# Altium footprint library Amin-Library.PcbLib: 601 footprints (part 10 of 38)
Each footprint in its own frame and in the unit in brackets; x right, y up, seen from the top. Pads: shape width x height; smd on the part's side, far side on the other; paste and mask are expansions set on the pad; w line width, h text height; cw(c..) or ccw(c..) is an arc to the next point about the centre after c.
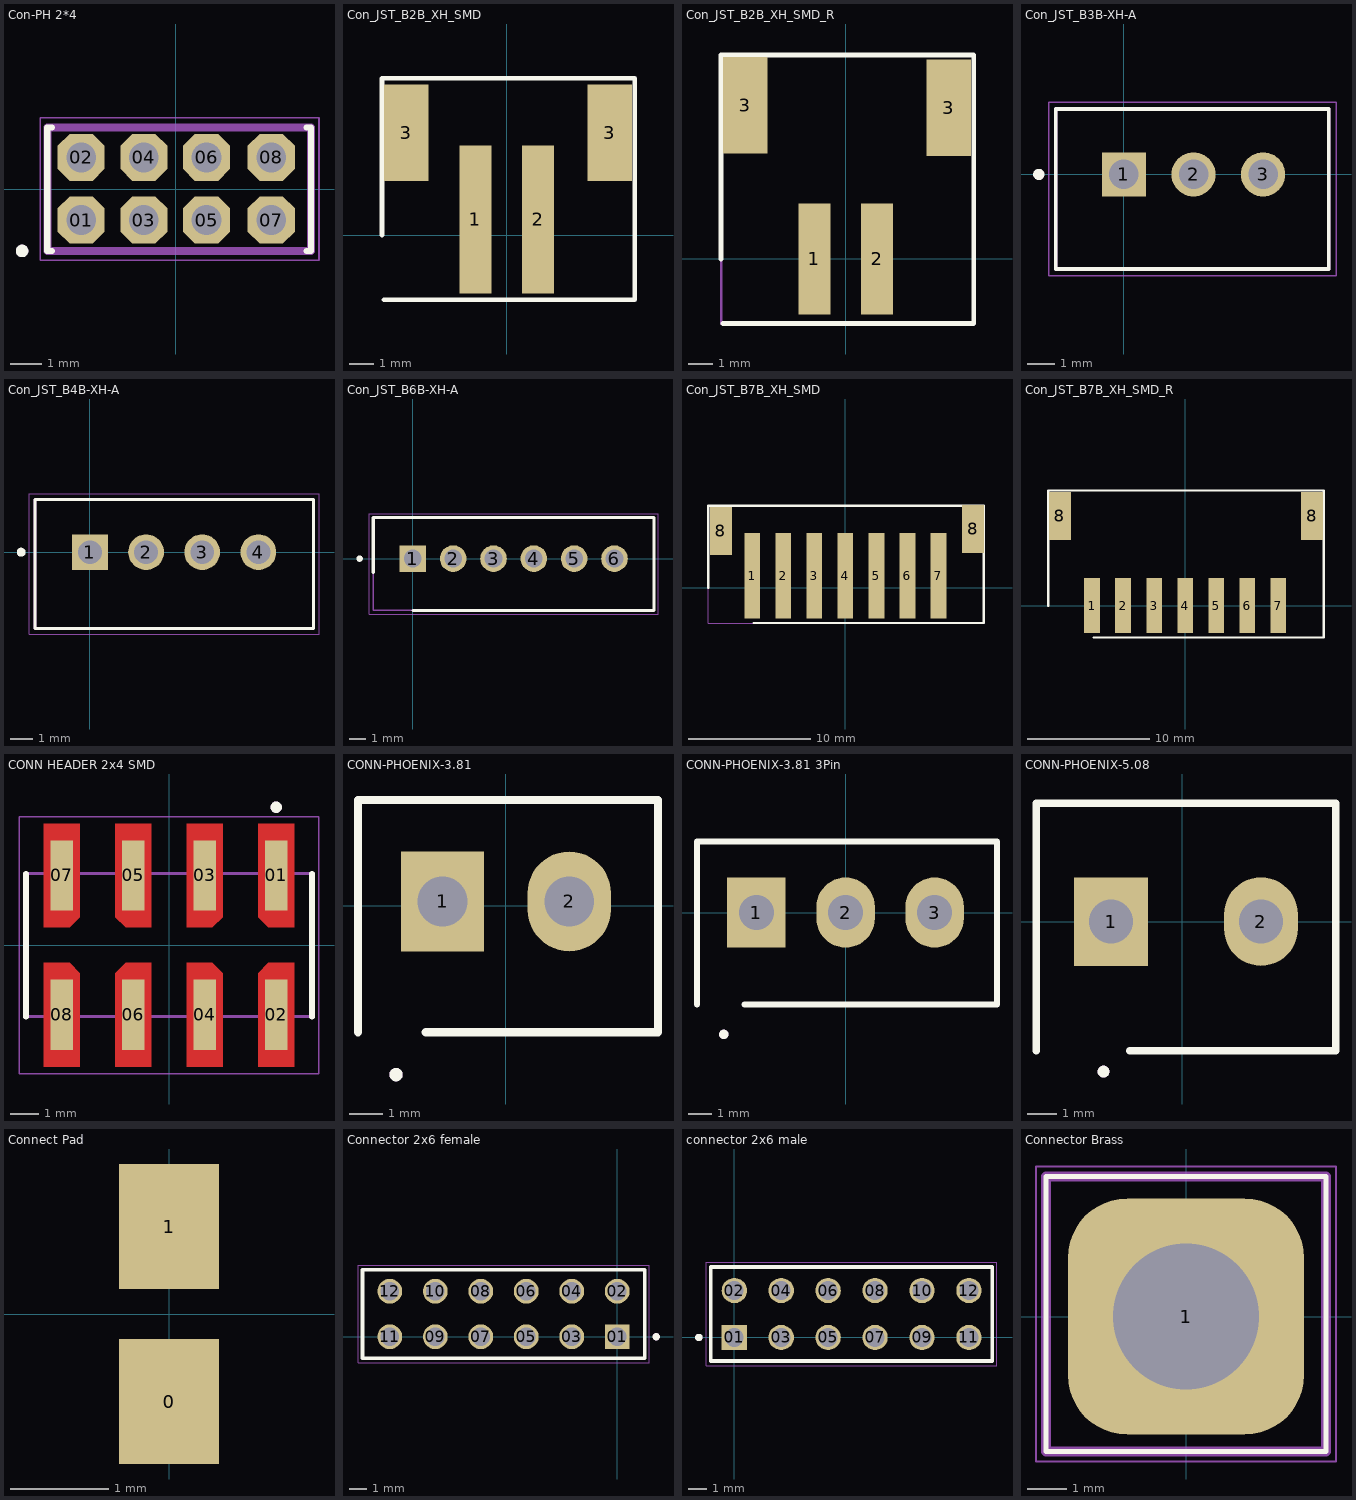
[diagram p9: the footprints below, top view; thin cyan lines are the x and y axes]

## Con-PH 2*4 [mil]
pads (8):
  oct 59.08x59.08 / inner oct 60x60 / far side oct 59.08x59.08 hole 37.4: 01(-118.74,-38.74) 02(-118.74,40) 03(-40,-38.74) 04(-40,40) 05(38.74,-38.74) 06(38.74,40) 07(120,-38.74) 08(120,40)
Top Overlay:
  circle w7.87: c-192.87,-77.56 r3.94
  lines w7.87: -155.71,-77.56 -161.22,-77.56 -161.22,77.56 -155.71,77.56 ; 164.49,-77.56 170,-77.56 170,77.56 164.49,77.56
Top Courtyard:
  lines w10: 170,77.56 170,-77.56 -161.22,-77.56 -161.22,77.56 170,77.56 ; 170,77.56 170,77.56
Mechanical 13:
  circle w7.87: c-192.87,-77.56 r3.94
  lines w3.94: 77.24,77.56 -161.22,77.56 ; -161.22,-77.56 -161.22,-67.56 -161.22,77.56 ; -161.22,-77.56 170,-77.56 170,77.56 -161.22,77.56 ; -161.22,-77.56 -161.22,77.56
Mechanical 15:
  lines w1.97: -170,-89.47 -170,90 180,90 180,-89.47 -170,-89.47
3D body "62000821121.stp": height 236.72, standoff -105.8, extent -157.48,-83.73 157.48,73.74

## Con_JST_B2B_XH_SMD [mil]
pads (4):
  rect 51.18x236.22 smd: 1(-50,25) 2(50,25)
  rect 71x154 smd paste+0 mask-77: 3(-160,163) 3(164,163)
Top Overlay:
  lines w7.87: -199,0 -199,250 204,250 204,-103 -195.85,-103
3D body "JST-XH_2V_SMD.step": height 303.15, standoff -1.97, extent -195.85,-86.67 197.85,244

## Con_JST_B2B_XH_SMD_R [mil]
pads (4):
  rect 51.18x177.17 smd: 1(-50,0) 2(50,0)
  rect 71x154 smd paste-77 mask-77: 3(-160,245) 3(164,241)
Top Overlay:
  lines w7.87: -199,0 -199,325 204,325 204,-103 -195.85,-103
Mechanical 13:
  lines w3.94: -198,-103 -198,326 204,326 204,-103 -198,-103
3D body "JST-XH2-SMD.step": height 236.22, standoff -3.94, extent -198.85,-76.49 194.85,325.09

## Con_JST_B3B-XH-A [mm]
pads (3):
  rect 1.59x1.59 hole 1.06: 1(0,0)
  round 1.59 hole 1.06: 2(2.5,0) 3(5,0)
Top Overlay:
  circle w0.2: c-3.06,0 r0.1
  lines w0.127: -2.45,-3.4 7.366,-3.4 7.366,2.35 -2.45,2.35 -2.45,-3.4
Mechanical 13:
  lines w0.127: -2.45,-3.4 7.366,-3.4 7.366,2.35 -2.45,2.35 -2.45,-3.4
Mechanical 15:
  lines w0.05: -2.7,-3.65 7.62,-3.65 7.62,2.6 -2.7,2.6 -2.7,-3.65
3D body "User Library-B3B-XH.STEP": height 7, standoff -3.4, extent -2.517,-3.4 7.383,2.35

## Con_JST_B4B-XH-A [mm]
pads (4):
  rect 1.59x1.59 hole 1.06: 1(0,0)
  round 1.59 hole 1.06: 2(2.5,0) 3(5,0) 4(7.5,0)
Top Overlay:
  circle w0.2: c-3.06,0 r0.1
  lines w0.127: -2.45,-3.4 -2.45,2.35 9.95,2.35 9.95,-3.4 -2.45,-3.4
Mechanical 13:
  lines w0.127: -2.45,-3.4 -2.45,2.35 9.95,2.35 9.95,-3.4 -2.45,-3.4
Mechanical 15:
  lines w0.05: -2.7,-3.65 -2.7,2.6 10.2,2.6 10.2,-3.65 -2.7,-3.65
3D body "User Library-B4B-XH-A.STEP": height 7.01, standoff -3.39, extent -2.39,-3.302 10.01,2.448

## Con_JST_B6B-XH-A [mm]
pads (6):
  rect 1.65x1.65 hole 1.1: 1(0,0)
  round 1.65 hole 1.1: 2(2.5,0) 3(5,0) 4(7.5,0) 5(10,0) 6(12.5,0)
Top Overlay:
  circle w0.2: c-3.302,0 r0.1
  lines w0.2: -2.45,-0.86 -2.45,2.54 14.95,2.54 14.95,-3.21 0,-3.21
Mechanical 13:
  lines w0.1: -2.45,-3.21 14.95,-3.21 14.95,2.54 -2.45,2.54 -2.45,-3.21
Mechanical 15:
  lines w0.05: -2.7,-3.46 15.2,-3.46 15.2,2.79 -2.7,2.79 -2.7,-3.46
3D body "User Library-jst-b6b-xh-a.step": height 7.01, standoff -3.39, extent -2.414,-3.556 14.986,2.194

## Con_JST_B7B_XH_SMD [mm]
pads (9):
  rect 1.3x7 smd paste-0.65: 1(-7.62,1) 2(-5.08,1) 3(-2.54,1) 4(0,1) 5(2.54,1) 6(5.08,1) 7(7.62,1)
  rect 1.803x3.912 smd paste+0 mask-1.956: 8(-10.185,4.674) 8(10.465,4.836)
Top Overlay:
  lines w0.2: -11.227,0 -11.227,6.731 11.354,6.731 11.354,-2.87 -7.493,-2.87
Top Paste:
  rectangle: -8.128,-2.515 -7.112,4.496
  rectangle: -5.588,-2.489 -4.572,4.521
  rectangle: -3.048,-2.515 -2.032,4.496
  rectangle: -0.533,-2.515 0.483,4.496
  rectangle: 2.032,-2.489 3.048,4.521
  rectangle: 4.572,-2.515 5.588,4.496
  rectangle: 7.112,-2.515 8.128,4.496
Mechanical 13:
  lines w0.1: -11.227,-2.87 11.379,-2.87 11.379,6.706 -11.227,6.706 -11.227,-2.87
3D body "JST-XH_7V_SMD.step": height 7.7, standoff -0.05, extent -11.174,-1.663 11.326,6.736

## Con_JST_B7B_XH_SMD_R [mm]
pads (9):
  rect 1.3x4.5 smd: 1(-7.62,0) 2(-5.08,0) 3(-2.54,0) 4(0,0) 5(2.54,0) 6(5.08,0) 7(7.62,0)
  rect 1.803x3.912 smd paste+0 mask-1.956: 8(-10.262,7.341) 8(10.389,7.341)
Top Overlay:
  lines w0.2: -11.227,0 -11.227,9.423 11.354,9.423 11.354,-2.616 -7.493,-2.616
3D body "JST-XH7-SMD.step": height 6, standoff -0.1, extent -11.275,-1.613 11.225,8.587

## CONN HEADER 2x4 SMD [mm]
pads (8):
  rect 0.8x2.5 smd paste-2 mask+0: 01(3.81,2.475) 02(3.81,-2.475) 03(1.27,2.475) 04(1.27,-2.475) 05(-1.27,2.475) 06(-1.27,-2.475) 07(-3.81,2.475) 08(-3.81,-2.475)
Top Layer:
  region: -3.175,-0.995 -3.175,-4.315 -4.445,-4.315 -4.445,-0.635 -3.535,-0.635
  region: -3.175,0.995 -3.535,0.635 -4.445,0.635 -4.445,4.315 -3.175,4.315
  region: -0.635,-4.315 -1.905,-4.315 -1.905,-0.995 -1.545,-0.635 -0.635,-0.635
  region: -0.635,0.635 -1.545,0.635 -1.905,0.995 -1.905,4.315 -0.635,4.315
  region: 1.905,-0.995 1.905,-4.315 0.635,-4.315 0.635,-0.635 1.545,-0.635
  region: 1.905,0.995 1.545,0.635 0.635,0.635 0.635,4.315 1.905,4.315
  region: 4.445,-4.315 3.175,-4.315 3.175,-0.995 3.535,-0.635 4.445,-0.635
  region: 4.445,0.635 3.535,0.635 3.175,0.995 3.175,4.315 4.445,4.315
Top Overlay:
  circle w0.2: c3.81,4.9 r0.1
  lines w0.2: -5.08,-2.54 -5.08,2.54 ; 5.08,-2.54 5.08,2.54
Top Paste:
  region: -3.175,-0.995 -3.175,-4.315 -4.445,-4.315 -4.445,-0.635 -3.535,-0.635
  region: -3.175,0.995 -3.535,0.635 -4.445,0.635 -4.445,4.315 -3.175,4.315
  region: -0.635,-4.315 -1.905,-4.315 -1.905,-0.995 -1.545,-0.635 -0.635,-0.635
  region: -0.635,0.635 -1.545,0.635 -1.905,0.995 -1.905,4.315 -0.635,4.315
  region: 1.905,-0.995 1.905,-4.315 0.635,-4.315 0.635,-0.635 1.545,-0.635
  region: 1.905,0.995 1.545,0.635 0.635,0.635 0.635,4.315 1.905,4.315
  region: 4.445,-4.315 3.175,-4.315 3.175,-0.995 3.535,-0.635 4.445,-0.635
  region: 4.445,0.635 3.535,0.635 3.175,0.995 3.175,4.315 4.445,4.315
Top Solder:
  region: -3.075,-0.995 -3.075,-4.415 -4.545,-4.415 -4.545,-0.535 -3.535,-0.535
  region: -3.075,0.995 -3.535,0.535 -4.545,0.535 -4.545,4.415 -3.075,4.415
  region: -0.535,-4.415 -2.005,-4.415 -2.005,-0.995 -1.545,-0.535 -0.535,-0.535
  region: -0.535,0.535 -1.545,0.535 -2.005,0.995 -2.005,4.415 -0.535,4.415
  region: 2.005,-0.995 2.005,-4.415 0.535,-4.415 0.535,-0.535 1.545,-0.535
  region: 2.005,0.995 1.545,0.535 0.535,0.535 0.535,4.415 2.005,4.415
  region: 4.545,-4.415 3.075,-4.415 3.075,-0.995 3.535,-0.535 4.545,-0.535
  region: 4.545,0.535 3.535,0.535 3.075,0.995 3.075,4.415 4.545,4.415
Mechanical 13:
  circle w0.2: c3.81,4.9 r0.1
  lines w0.1: -5.08,-2.54 5.08,-2.54 5.08,2.54 -5.08,2.54 -5.08,-2.54
Mechanical 15:
  lines w0.05: -5.33,-4.565 5.33,-4.565 5.33,4.565 -5.33,4.565 -5.33,-4.565
3D body "TSM-104-02-S-DV (1).stp": height 11.95, standoff 0.01, extent -5.08,-3.848 5.08,3.594

## CONN-PHOENIX-3.81 [mm]
pads (2):
  rect 2.5x3 hole 1.5: 1(-1.905,0.127)
  oval 2.5x3 hole 1.5: 2(1.905,0.127)
Top Overlay:
  circle w0.2: c-3.302,-5.08 r0.1
  lines w0.254: -4.445,-3.81 -4.445,3.175 4.572,3.175 4.572,-3.81 -2.413,-3.81
Mechanical 13:
  circle w0.2: c-3.302,-5.08 r0.1
3D body "User Library-CO2-3_81.step": height 9.2, standoff -3.4, extent -4.441,-4.075 4.569,3.175

## CONN-PHOENIX-3.81 3Pin [mm]
pads (3):
  rect 2.5x3 hole 1.5: 1(-3.81,0)
  oval 2.5x3 hole 1.5: 2(0,0) 3(3.81,0)
Top Overlay:
  circle w0.2: c-5.207,-5.207 r0.1
  lines w0.254: -6.35,-3.937 -6.35,3.048 6.477,3.048 6.477,-3.937 -4.318,-3.937
Mechanical 13:
  circle w0.2: c-5.207,-5.207 r0.1
3D body "1707434.stp": height 9.2, standoff -2.6, extent -6.41,-4.191 6.41,3.059

## CONN-PHOENIX-5.08 [mm]
pads (2):
  rect 2.5x3 hole 1.5: 1(-2.413,0)
  oval 2.5x3 hole 1.5: 2(2.667,0)
Top Overlay:
  circle w0.2: c-2.667,-5.08 r0.1
  lines w0.254: -4.953,-4.381 -4.953,4 5.207,4 5.207,-4.381 -1.778,-4.381
Mechanical 13:
  circle w0.2: c-2.667,-5.08 r0.1
3D body "User Library-KF2EDGK-5_08-2P.step": height 12, standoff -4.2, extent -5.08,-4.381 5.08,4.119

## Connect Pad [mil] "Connect Pad 2pin"
pads (2):
  rect 40x50 smd: 0(0,-35) 1(0,35)

## Connector 2x6 female [mm]
pads (12):
  rect 1.39x1.39 hole 1.04: 01(0,0)
  round 1.39 hole 1.04: 02(0,2.54) 03(-2.54,0) 04(-2.54,2.54) 05(-5.08,0) 06(-5.08,2.54) 07(-7.62,0) 08(-7.62,2.54) 09(-10.16,0) 10(-10.16,2.54) 11(-12.7,0) 12(-12.7,2.54)
Top Overlay:
  circle w0.2: c2.175,0 r0.1
  lines w0.2: -14.225,-1.205 -14.225,3.745 1.525,3.745 1.525,-1.205 -14.225,-1.205
Mechanical 13:
  circle w0.2: c2.175,0 r0.1
  lines w0.1: -14.225,-1.205 -14.225,3.745 1.525,3.745 1.525,-1.205 -14.225,-1.205
Mechanical 15:
  lines w0.05: -14.475,-1.455 -14.475,3.995 1.775,3.995 1.775,-1.455 -14.475,-1.455
3D body "25944.stp": height 14.01, standoff 0.01, extent -14.097,-1.193 1.143,3.937

## connector 2x6 male [mm]
pads (12):
  rect 1.37x1.37 hole 1.02: 01(0,0)
  round 1.37 hole 1.02: 02(0,2.54) 03(2.54,0) 04(2.54,2.54) 05(5.08,0) 06(5.08,2.54) 07(7.62,0) 08(7.62,2.54) 09(10.16,0) 10(10.16,2.54) 11(12.7,0) 12(12.7,2.54)
Top Overlay:
  circle w0.2: c-1.92,0 r0.1
  lines w0.2: -1.27,-1.27 -1.27,3.81 13.97,3.81 13.97,-1.27 -1.27,-1.27
Mechanical 13:
  circle w0.2: c-1.92,0 r0.1
  lines w0.1: -1.27,-1.27 -1.27,3.81 13.97,3.81 13.97,-1.27 -1.27,-1.27
Mechanical 15:
  lines w0.05: -1.52,-1.52 -1.52,4.06 14.22,4.06 14.22,-1.52 -1.52,-1.52
3D body "strip_tsw-106-07-g-d.stp": height 8.39, standoff -2.53, extent -1.27,-1.27 13.97,3.81

## Connector Brass [mm]
pads (1):
  rrect50% 6x6 / inner rrect50% 0x0 / far side rrect50% 0x0 hole 3.7: 1(0,0)
Top Overlay:
  lines w0.127: -3.556,-3.429 -3.556,3.556 3.556,3.556 3.556,-3.429 -3.556,-3.429
Mechanical 4:
  lines w0.127: -3.556,-3.429 3.556,-3.429 3.556,3.556 -3.556,3.556 -3.556,-3.429
Top Courtyard:
  lines w0.254: -3.556,-3.429 -3.556,3.556 3.556,3.556 3.556,-3.429 -3.556,-3.429
Mechanical 16:
  lines w0.05: -3.81,-3.683 -3.81,3.81 3.81,3.81 3.81,-3.683 -3.81,-3.683
3D body "NORDEX-DEFAULT.step": height -0.46, standoff -8, extent -2.413,-2.413 2.413,2.413